# EAGLE library part TCM1-63AX+ (library TCM1-63AX+)
RF Balun 10MHz ~ 6GHz 50 / 50Ohm 6-SMD Module 10MHz ~ 6GHz 9.42dB 2.5dB Source: Datasheet <https://www.minicircuits.com/pdfs/TCM1-63AX .pdf?srsltid=AfmBOopccNdTW2iQ-1Z0eqWfv7bI4WP4UY3kaUh0VYjPlJWZI-4Uwe80>
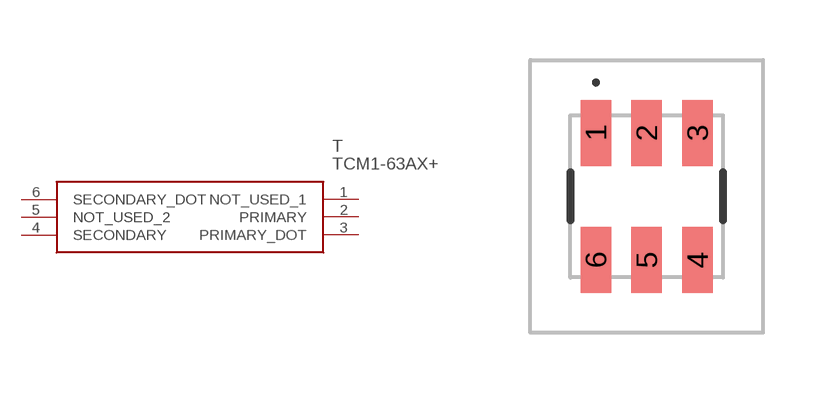
[diagram p0: symbol with the pads of TCM163AX; footprint TCM163AX]

Designator prefix T

## TCM1-63AX+ (Description: RF Balun 10MHz ~ 6GHz 50 / 50Ohm 6-SMD Module 10MHz ~ 6GHz 9.42dB 2.5dB; Height: 4.06mm; Manufacturer_Name: Mini-Circuits; Manufacturer_Part_Number: TCM1-63AX+; Mouser_Part_Number: 139-TCM1-63AX; Mouser_Price-Stock: https://www.mouser.co.uk/ProductDetail/Mini-Circuits/TCM1-63AX%2b?qs=xZ%2FP%252Ba9zWqaLvjkaLlAVvw%3D%3D)  [TCM163AX]
1  NOT_USED_1
2  PRIMARY
3  PRIMARY_DOT
4  SECONDARY
5  NOT_USED_2
6  SECONDARY_DOT

## Footprint TCM163AX (pad centres in mm)
DB1627_2026-3.3
smd 0.76 x 1.65: 1 -1.27,1.59; 2 0,1.59; 3 1.27,1.59; 4 1.27,-1.59; 5 0,-1.59; 6 -1.27,-1.59